# EAGLE library part IC_74HCT4051 (library dp_devices.v6)
74HCT4051 8-channel analog mux/demux
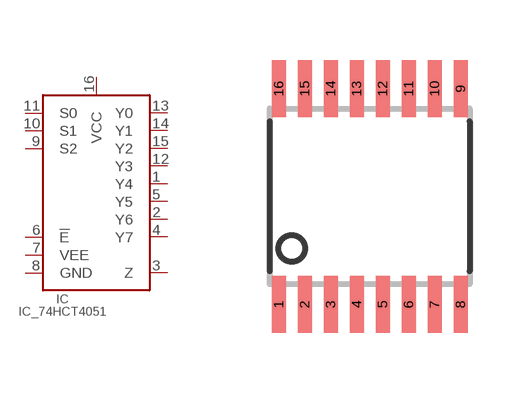
[diagram p178: symbol with the pads of TSSOP-16; footprint TSSOP-16]

Designator prefix IC

## IC_74HCT4051  [TSSOP-16]
1  Y4  out
2  Y6  out
3  Z
4  Y7  out
5  Y5  out
6  !E  in
7  VEE  pwr
8  GND  pwr
9  S2  in
10  S1  in
11  S0  in
12  Y3  out
13  Y0  out
14  Y1  out
15  Y2  out
16  VCC  pwr

## Footprint TSSOP-16 (pad centres in mm)
smd 0.35 x 1.43: 1 -2.275,-2.7; 2 -1.625,-2.7; 3 -0.975,-2.7; 4 -0.325,-2.7; 5 0.325,-2.7; 6 0.975,-2.7; 7 1.625,-2.7; 8 2.275,-2.7; 9 2.275,2.7; 10 1.625,2.7; 11 0.975,2.7; 12 0.325,2.7; 13 -0.325,2.7; 14 -0.975,2.7; 15 -1.625,2.7; 16 -2.275,2.7